# Altium footprint library SYNCBOX_TST.PcbLib: 267 footprints (part 17 of 17)
Each footprint in its own frame and in the unit in brackets; x right, y up, seen from the top. Pads: shape width x height; smd on the part's side, far side on the other; paste and mask are expansions set on the pad; w line width, h text height; cw(c..) or ccw(c..) is an arc to the next point about the centre after c.
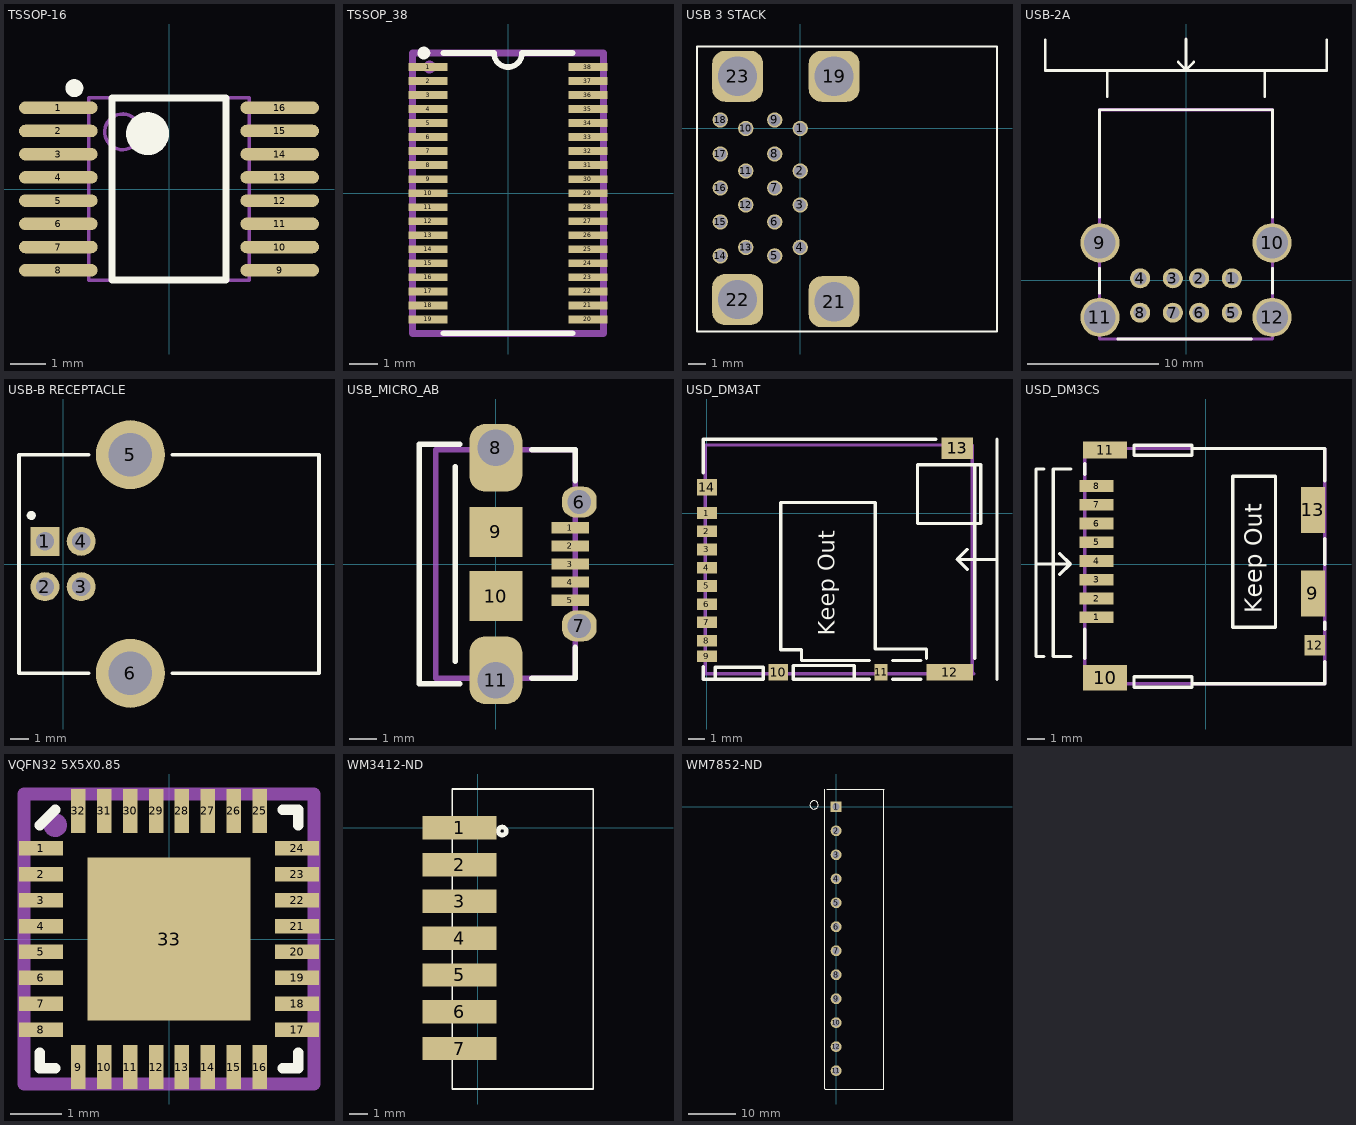
[diagram p16: the footprints below, top view; thin cyan lines are the x and y axes]

## TSSOP-16 [mm] "4.40MM BODY, 0.65MM PITCH"
height 1.2
pads (16):
  oval 2.2x0.35 smd: 1(-3.1,2.275) 2(-3.1,1.625) 3(-3.1,0.975) 4(-3.1,0.325) 5(-3.1,-0.325) 6(-3.1,-0.975) 7(-3.1,-1.625) 8(-3.1,-2.275) 9(3.1,-2.275) 10(3.1,-1.625) 11(3.1,-0.975) 12(3.1,-0.325) 13(3.1,0.325) 14(3.1,0.975) 15(3.1,1.625) 16(3.1,2.275)
Top Overlay:
  circle w0.25: c-2.65,2.825 r0.125
  circle w0.6: c-0.6,1.55 r0.3
  lines w0.2: -1.6,-2.55 -1.6,2.55 1.6,2.55 1.6,-2.55 -1.6,-2.55
Mechanical 13:
  circle w0.1: c-1.3,1.6 r0.5
  lines w0.1: -2.25,-2.55 -2.25,2.55 2.25,2.55 2.25,-2.55 -2.25,-2.55
3D body: height 1.2, standoff 0.15, extent -2.25,-2.55 2.25,2.55

## TSSOP_38 [mm]
pads (38):
  rect 1.4x0.28 smd mask+0.025: 1(-2.85,4.5) 2(-2.85,4) 3(-2.85,3.5) 4(-2.85,3) 5(-2.85,2.5) 6(-2.85,2) 7(-2.85,1.5) 8(-2.85,1) 9(-2.85,0.5) 10(-2.85,0) 11(-2.85,-0.5) 12(-2.85,-1) 13(-2.85,-1.5) 14(-2.85,-2) 15(-2.85,-2.5) 16(-2.85,-3) 17(-2.85,-3.5) 18(-2.85,-4) 19(-2.85,-4.5) 20(2.85,-4.5) 21(2.85,-4) 22(2.85,-3.5) 23(2.85,-3) 24(2.85,-2.5) 25(2.85,-2) 26(2.85,-1.5) 27(2.85,-1) 28(2.85,-0.5) 29(2.85,0) 30(2.85,0.5) 31(2.85,1) 32(2.85,1.5) 33(2.85,2) 34(2.85,2.5) 35(2.85,3) 36(2.85,3.5) 37(2.85,4) 38(2.85,4.5)
Top Overlay:
  circle w0.254: c-3,5 r0.1
  lines w0.2: -2.3,-5 2.3,-5 ; -2.3,5 -0.5,5 ccw(c-0.001,5) 0.499,5 ; 0.5,5 2.3,5
Mechanical 16:
  circle w0.254: c-2.8,4.5 r0.1
  lines w0.254: -3.4,-5 -3.4,5 3.4,5 3.4,-5 -3.4,-5
Mechanical 29:
  text ".Designator" at -0.5,0.8 h1.52
3D body: height 1.2, standoff 0, extent -2.3,-5 2.3,5

## USB 3 STACK [mm]
pads (22):
  round 0.9 hole 0.7: 1(0,0) 2(0,-2.5) 3(0,-4.5) 4(0,-7) 5(-1.5,-7.5) 6(-1.5,-5.5) 7(-1.5,-3.5) 8(-1.5,-1.5) 9(-1.5,0.5) 10(-3.2,0) 11(-3.2,-2.5) 12(-3.2,-4.5) 13(-3.2,-7) 14(-4.7,-7.5) 15(-4.7,-5.5) 16(-4.7,-3.5) 17(-4.7,-1.5) 18(-4.7,0.5)
  rrect50% 3x3 / inner round 2.3 / far side rrect50% 3x3 hole 2.3: 19(2,3.07)
  rrect50% 3x3 hole 2.3: 21(2,-10.197) 22(-3.68,-10.07) 23(-3.68,3.07)
Top Overlay:
  lines w0.102: -6.072,-11.946 11.581,-11.946 11.581,4.818 5.608,4.818 -2.359,4.818 -6.072,4.818 -6.072,-11.946
3D body "484060003.stp": height 16.2, standoff -3.2, extent -5.936,-11.377 11.524,4.293

## USB-2A [mm]
pads (12):
  round 1.524 hole 1: 1(3.5,0.13) 2(1,0.13) 3(-1,0.13) 4(-3.5,0.13) 5(3.5,-2.49) 6(1,-2.49) 7(-1,-2.49) 8(-3.5,-2.49)
  round 3 hole 2.4: 9(-6.57,2.84) 10(6.57,2.84) 11(-6.57,-2.84) 12(6.57,-2.84)
Top Overlay:
  lines w0.2: -10.75,18.35 -10.75,16 10.75,16 10.75,18.35 ; -6.6,-1 -6.6,0.9 ; -6.6,4.8 -6.6,13 6.6,13 6.6,4.8 ; -6,14 -6,16 ; -5.2,-4.5 5,-4.5 ; -0.6,16.65 0,16.05 ; 0,18.4 0,16.05 ; 0.6,16.65 0,16.05 ; 6,14 6,16 ; 6.6,-1 6.6,0.9
Mechanical 16:
  lines w0.254: -6.6,-4.5 -6.6,13 6.6,13 6.6,-4.5 -6.6,-4.5
Mechanical 29:
  text ".Designator" at -2,5.8 h1.52
3D body "c-5787617-1-c-3d.stp": height 15.78, standoff -4.37, extent -8.1,-4.1 8.139,13.08

## USB-B RECEPTACLE [mm]
height 11.5
pads (6):
  rect 1.6x1.6 hole 1: 1(-1,1.25)
  round 1.6 hole 1: 2(-1,-1.25) 3(1,-1.25) 4(1,1.25)
  round 3.8 hole 2.4: 5(3.71,6.02) 6(3.71,-6.02)
Top Overlay:
  circle w0.25: c-1.75,2.675 r0.125
  lines w0.2: -2.425,-3.675 -2.425,6.02 1.41,6.02 ; -2.425,-2.21 -2.425,-6.02 1.41,-6.02 ; -2.425,-0.29 -2.425,0.05 ; 6.01,-6.02 14.097,-6.02 14.097,6.02 6.01,6.02
3D body "A-USBSB (ASSMANN).stp": height 11.02, standoff -3.63, extent -2.44,-7.45 14.06,7.45

## USB_MICRO_AB [mm]
pads (11):
  rect 1.35x0.4 smd mask+0.025: 1(2.675,1.3) 2(2.675,0.65) 3(2.675,0) 4(2.675,-0.65) 5(2.675,-1.3)
  rrect84% 1.25x1.1 hole 0.85 mask+0.04: 6(3,2.225) 7(3,-2.225)
  rrect60% 1.9x2.425 hole 1.3 copper offset 0,-0.363: 8(0,4.175)
  rect 1.9x1.8 smd paste-10: 9(0,1.15) 10(0,-1.15)
  rrect60% 1.9x2.425 hole 1.3 copper offset 0,0.363: 11(0,-4.175)
Top Overlay:
  lines w0.2: -1.45,-3.5 -1.45,3.5 ; -1.3,-4.3 -2.75,-4.3 -2.75,4.3 -1.3,4.3 ; 1.3,-4.1 2.85,-4.1 2.85,-3 ; 1.3,4.1 2.85,4.1 2.85,3
Mechanical 16:
  lines w0.2: -2.15,-4.1 -2.15,4.1 2.85,4.1 2.85,-4.1 -2.15,-4.1
Mechanical 29:
  text ".Designator" at 1.2,-1.9 h1.52
3D body "475890001.stp": height 2.76, standoff -0.58, extent -2.75,-4.325 3.045,4.325

## USD_DM3AT [mm]
pads (14):
  rect 1.2x0.7 smd: 1(0,0) 2(0,-1.1) 3(0,-2.2) 4(0,-3.3) 5(0,-4.4) 6(0,-5.5) 7(0,-6.6)
  rect 1.2x0.7 smd mask+0.07: 8(0,-7.7) 9(0,-8.65)
  rect 1.2x1 smd: 10(4.3,-9.6) 14(0,1.55)
  rect 0.8x1 smd: 11(10.5,-9.6)
  rect 2.8x1 smd: 12(14.65,-9.6)
  rect 1.9x1.3 smd: 13(15.1,3.9)
Top Overlay:
  lines w0.2: -0.231,-9.271 -0.231,-10.033 3.4,-10.033 ; -0.231,2.413 -0.231,4.445 13.8,4.445 ; 0.5,-10.033 0.5,-9.3 3.4,-9.3 3.4,-10.004 ; 8.89,-10.033 8.89,-9.21 8.89,-9.2 5.2,-9.2 5.2,-10.033 9.8,-10.033 ; 9.8,-8.9 5.7,-8.9 5.7,-8.255 4.445,-8.255 4.445,0.635 10.16,0.635 10.16,-8.2 13.245,-8.2 13.245,-8.755 ; 11.2,-10.033 12.9,-10.033 ; 11.2,-8.9 12.9,-8.9 ; 15.7,-3.4 15.1,-2.8 ; 15.7,-2.2 15.1,-2.8 ; 16.152,-8.763 16.152,2.921 ; 17.45,-2.8 15.1,-2.8 ; 17.495,-10.033 17.495,4.445 ; 12.7,-0.635 16.51,-0.635 16.51,2.921 12.7,2.921 12.7,-0.635
  text "Keep Out" at 7.7,-7.4 h1
Mechanical 16:
  lines w0.2: -0.1,-9.7 16.1,-9.7 16,-9.6 16,4.1 -0.1,4.1 -0.1,-9.7
Mechanical 29:
  text ".Designator" at 8.5,-4.8 h1.52
3D body "DM3AT-SF-PEJM5.stp": height 1.68, standoff 0, extent -0.1,-9.7 16.05,4.15

## USD_DM3CS [mm]
pads (13):
  rect 2x0.7 smd: 1(-6.4,-3.125) 2(-6.4,-2.025) 3(-6.4,-0.925) 4(-6.4,0.175) 5(-6.4,1.275) 6(-6.4,2.375) 7(-6.4,3.475) 8(-6.4,4.575)
  rect 1.4x2.7 smd: 9(6.3,-1.725) 13(6.3,3.175)
  rect 2.6x1.5 smd: 10(-5.9,-6.675)
  rect 2.6x1 smd: 11(-5.9,6.675)
  rect 1.2x1.2 smd: 12(6.4,-4.775)
Top Overlay:
  lines w0.2: -9.95,0 -7.95,0 ; -9.5,-5.425 -9.95,-5.425 -9.95,5.575 -9.5,5.575 ; -8.55,-0.6 -7.95,0 ; -8.55,0.6 -7.95,0 ; -7.9,-5.425 -8.95,-5.425 -8.95,5.575 -7.9,5.575 ; -7.1,-5.525 -7.1,-3.825 ; -7.1,5.275 -7.1,5.875 ; -0.8,-7.025 7,-7.025 7,-5.725 ; -0.8,6.775 7,6.775 7,4.875 ; 7,-3.825 7,-3.425 ; 7,-0.025 7,1.475 ; -4.2,-7.225 -4.2,-6.625 -0.8,-6.625 -0.8,-7.225 -4.2,-7.225 ; -4.2,6.375 -0.8,6.375 -0.8,6.975 -4.2,6.975 -4.2,6.375 ; 1.6,-3.7 1.6,5.15 4.1,5.15 4.1,-3.7 1.6,-3.7
  text "Keep Out" at 3.3,-2.9 h1
Mechanical 16:
  lines w0.2: -7.1,-7.025 -7.1,6.775 7,6.775 7,-7.025 -7.1,-7.025
Mechanical 29:
  text ".Designator" at -0.2,-2 h1.52
3D body "DM3CS-SF.stp": height 1.98, standoff 0.05, extent -7.1,-7.025 7,6.775

## VQFN32 5X5X0.85 [mm]
pads (33):
  rect 0.85x0.28 smd mask+0.025: 1(-2.475,1.75) 2(-2.475,1.25) 3(-2.475,0.75) 4(-2.475,0.25) 5(-2.475,-0.25) 6(-2.475,-0.75) 7(-2.475,-1.25) 8(-2.475,-1.75) 17(2.475,-1.75) 18(2.475,-1.25) 19(2.475,-0.75) 20(2.475,-0.25) 21(2.475,0.25) 22(2.475,0.75) 23(2.475,1.25) 24(2.475,1.75)
  rect 0.28x0.85 smd mask+0.025: 9(-1.75,-2.475) 10(-1.25,-2.475) 11(-0.75,-2.475) 12(-0.25,-2.475) 13(0.25,-2.475) 14(0.75,-2.475) 15(1.25,-2.475) 16(1.75,-2.475) 25(1.75,2.475) 26(1.25,2.475) 27(0.75,2.475) 28(0.25,2.475) 29(-0.25,2.475) 30(-0.75,2.475) 31(-1.25,2.475) 32(-1.75,2.475)
  rect 3.15x3.15 smd paste-10 mask+0.025: 33(0,0)
Top Overlay:
  lines w0.2: -2.5,-2.2 -2.5,-2.5 -2.2,-2.5 ; -2.5,2.2 -2.2,2.5 ; 2.2,-2.5 2.5,-2.5 2.5,-2.2 ; 2.2,2.5 2.5,2.5 2.5,2.2
Top Paste:
  rectangle: -1.5,0.1 -0.1,1.5
  region: 0.1,1.5 0.1,0.1 1.5,0.1 1.5,1.5
  region: -0.1,-1.5 -0.1,-0.1 -1.5,-0.1 -1.5,-1.5
  region: 1.5,-0.1 0.1,-0.1 0.1,-1.5 1.5,-1.5
Mechanical 16:
  circle w0.254: c-2.2,2.2 r0.1
  lines w0.254: -2.8,-2.8 -2.8,2.8 2.8,2.8 2.8,-2.8 -2.8,-2.8
Mechanical 29:
  text ".Designator" at -0.6,1 h1.2
3D body: height 0.9, standoff 0, extent -2.5,-2.5 2.5,2.5

## WM3412-ND [mm]
pads (7):
  rect 4x1.27 smd: 1(-1,0) 2(-1,-2) 3(-1,-4) 4(-1,-6) 5(-1,-8) 6(-1,-10) 7(-1,-12)
Top Overlay:
  lines w0.1: -1.397,-14.199 6.274,-14.199 6.274,2.108 -1.397,2.108 -1.397,-14.199
  lines w0.254: 1.536,-0.218 cw(c1.321,-0.178) 1.539,-0.178
3D body "532540770.STEP": height 4.13, standoff -3.57, extent -1.389,-14.096 5.911,1.904

## WM7852-ND [mil]
pads (12):
  rect 90x90 hole 60: 1(0,0)
  round 90 hole 60: 2(0,-199.28) 3(0,-398.55) 4(0,-597.82) 5(0,-797.09) 6(0,-996.37) 7(0,-1195.64) 8(0,-1394.91) 9(0,-1594.18) 10(0,-1793.45) 11(0,-2192) 12(0,-1992.73)
Top Overlay:
  circle w10: c-183,16 r34.71
  lines w6: -96,145 -96,-2340 -92,-2344 396,-2344 396,148 399,145 -78,145
3D body "395321012.stp": height 330, standoff -150, extent -81,-2333.5 389,145.5